# Altium footprint library Switch-2.PcbLib: 1 footprints
Each footprint in its own frame and in the unit in brackets; x right, y up, seen from the top. Pads: shape width x height; smd on the part's side, far side on the other; paste and mask are expansions set on the pad; w line width, h text height; cw(c..) or ccw(c..) is an arc to the next point about the centre after c.
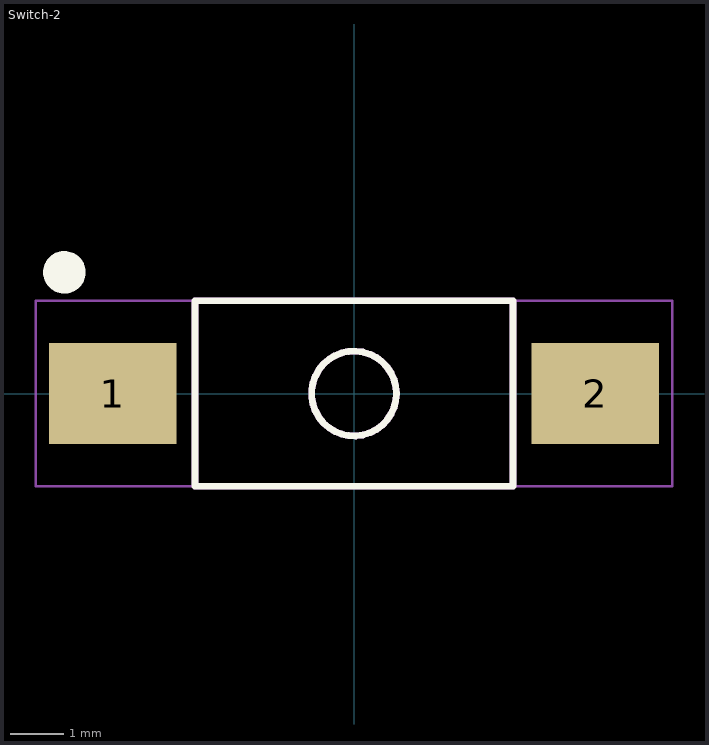
[diagram p0: the footprint, top view; thin cyan lines are the x and y axes]

## Switch-2 [mm]
pads (2):
  rect 2.4x1.9 smd: 1(-4.55,0) 2(4.55,0)
Top Overlay:
  circle w0.4: c-5.461,2.286 r0.2
  circle w0.127: c0,0 r0.8
  lines w0.127: -3,-1.75 3,-1.75 3,1.75 -3,1.75 -3,-1.75
Mechanical 1:
  circle w0.127: c0,0 r0.8
  lines w0.05: -6,-1.75 -6,1.75 6,1.75 6,-1.75 -6,-1.75
  lines w0.127: -3,-1.75 3,-1.75 3,1.75 -3,1.75 -3,-1.75
3D body "Switch-2.STEP": height 2.51, standoff 0, extent -4.026,-1.829 4.026,1.829